# Altium integrated library Communication_Lib.IntLib: 23 symbols
Pins are listed as number, name and electrical type; pins without a type are passive.

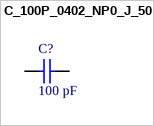
[diagram p0: symbol C_100P_0402_NP0_J_50]

## C_100P_0402_NP0_J_50
designator C?, comment 100 pF
Part Number: GRM1555C1H101JZ01D; Manufacturer: Murata; Value: 100 pF
footprint CAPC1005X55X25LL05T10 (Chip Capacitor, 2-Leads, Body 1.00x0.50mm, IPC High Density)
footprint CAPC1005X55X25NL05T10 (Chip Capacitor, 2-Leads, Body 1.00x0.50mm, IPC Medium Density)
footprint CAPC1005X55X25ML05T10 (Chip Capacitor, 2-Leads, Body 1.00x0.50mm, IPC Low Density)
pins: 1, 2
1 alternate drawing of the same symbol


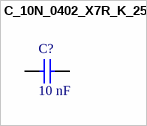
[diagram p1: symbol C_10N_0402_X7R_K_25]

## C_10N_0402_X7R_K_25
designator C?, comment 10 nF
Manufacturer: Murata; Part Number: GRM155R71E103KA01D; Value: 10 nF
footprint CAPC1005X55X25LL05T10 (Chip Capacitor, 2-Leads, Body 1.05x0.55mm, IPC High Density)
footprint CAPC1005X55X25NL05T10 (Chip Capacitor, 2-Leads, Body 1.05x0.55mm, IPC Medium Density)
footprint CAPC1005X55X25ML05T10 (Chip Capacitor, 2-Leads, Body 1.05x0.55mm, IPC Low Density)
pins: 1, 2
1 alternate drawing of the same symbol


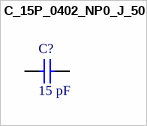
[diagram p2: symbol C_15P_0402_NP0_J_50]

## C_15P_0402_NP0_J_50
designator C?, comment 15 pF
Part Number: GRM1555C1H150JZ01D; Manufacturer: Murata; Value: 15 pF
footprint CAPC1005X55X25LL05T10 (Chip Capacitor, 2-Leads, Body 1.00x0.50mm, IPC High Density)
footprint CAPC1005X55X25NL05T10 (Chip Capacitor, 2-Leads, Body 1.00x0.50mm, IPC Medium Density)
footprint CAPC1005X55X25ML05T10 (Chip Capacitor, 2-Leads, Body 1.00x0.50mm, IPC Low Density)
pins: 1, 2
1 alternate drawing of the same symbol


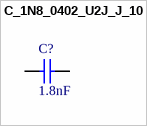
[diagram p3: symbol C_1N8_0402_U2J_J_10]

## C_1N8_0402_U2J_J_10
designator C?, comment 1.8nF
GRM1557U1A182JA01D; Manufacturer: Murata; Part Number: GRM1557U1A182JA01D; Value: 1.8nF
footprint CAPC1005X55X25LL05T10 (Chip Capacitor, 2-Leads, Body 1.05x0.55mm, IPC High Density)
footprint CAPC1005X55X25NL05T10 (Chip Capacitor, 2-Leads, Body 1.05x0.55mm, IPC Medium Density)
footprint CAPC1005X55X25ML05T10 (Chip Capacitor, 2-Leads, Body 1.05x0.55mm, IPC Low Density)
pins: 1, 2
1 alternate drawing of the same symbol


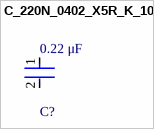
[diagram p4: symbol C_220N_0402_X5R_K_10]

## C_220N_0402_X5R_K_10
designator C?, comment 0.22 μF
C0603 0.22 μF X7R 30ppm/°C 10.00% 10 V; Manufacturer Part Number: C0603C224K8RAC; Manufacturer: KEMET; Automotive Grade: Grade 1; Material: Ceramic; Voltage Rating: 10 V; Tolerance: 0.1; Capacitance: 0.22 μF; Device Class L2: Capacitors; Temperature Range High: +125°C; RoHS: TRUE; Device Class L1: Passive Components; Temperature: -55°C to +125°C; Temperature Coefficient: 30ppm/°C; ComponentLink2Description: Datasheet; Device Class L3: Ceramic Capacitors; ComponentLink2URL: https://api.kemet.com/component-edge/download/datasheet/C0603C100J5GACAUTO.pdf; Value: 0.22 μF; Category: Cap; Lead Free: Yes; Automotive: Yes; Height: 0.87mm; Temperature Characteristic: X7R; Mouser Description: Multilayer Ceramic Capacitors MLCC - SMD/SMT 50volts 0.22 uF C0G X7R; Octopart: https://octopart.com/c0603c224k8rac-kemet-7455784; Package: C0603C-CF; Temperature Range Low: -55°C
footprint FP-C0603C-CF-IPC_B
footprint FP-C0603C-CF-MFG
footprint FP-C0603C-CF-IPC_A
footprint FP-C0603C-CF-IPC_C
pins: 1, 2


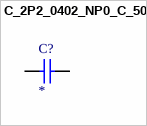
[diagram p5: symbol C_2P2_0402_NP0_C_50]

## C_2P2_0402_NP0_C_50
designator C?
Manufacturer: Murata; Part Number: GRM1555C1H2R2CZ01D; Value: *
footprint CAPC1005X55X25LL05T10 (Chip Capacitor, 2-Leads, Body 1.00x0.50mm, IPC High Density)
footprint CAPC1005X55X25NL05T10 (Chip Capacitor, 2-Leads, Body 1.00x0.50mm, IPC Medium Density)
footprint CAPC1005X55X25ML05T10 (Chip Capacitor, 2-Leads, Body 1.00x0.50mm, IPC Low Density)
pins: 1, 2
1 alternate drawing of the same symbol


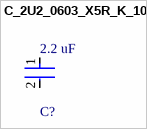
[diagram p6: symbol C_2U2_0603_X5R_K_10]

## C_2U2_0603_X5R_K_10
designator C?, comment 2.2 uF
0603 2.2 uF 6.3 V 10% Tolerance X7R Multilayer Ceramic Capacitor; Manufacturer: YAGEO; Manufacturer Part Number: CC0603KRX7R5BB225; Voltage Rating: 6.3 V; Temperature Coefficient: 15%; Tolerance: 0.1; Mouser Description: Multilayer Ceramic Capacitors MLCC - SMD/SMT 2.2uF 6.3V X7R 10%; Value: 2.2 uF; Lead Free: Yes; Temperature Range Low: -55°C; ComponentLink2Description: Datasheet; Package: CC0603-DA; Temperature Range High: +125°C; Voltage: 6.3 V; Octopart: https://octopart.com/cc0603krx7r5bb225-yageo-25629540; Category: Cap; Height: 0.9mm; Temperature Characteristic: X7R; RoHS: TRUE; Device Class L3: Ceramic Capacitors; Material: Ceramic; Automotive: No; Device Class L1: Passive Components; Capacitance: 2.2 uF; Digikey Description: 0603 2.2 uF 6.3 V 10% Tolerance X7R Multilayer Ceramic Capacitor; Temperature: -55°C to +125°C; ComponentLink2URL: http://www.yageo.com/documents/recent/UPY-GPHC_X7R_6.3V-to-50V_18.pdf; Footprint Url: http://www.yageo.com/exep/pages/download/literatures/UPY-C_GEN_24.pdf; Device Class L2: Capacitors
footprint FP-CC0603-DA-IPC_B
footprint FP-CC0603-DA-IPC_A
footprint FP-CC0603-DA-IPC_C
footprint FP-CC0603-DA-MFG
pins: 1, 2


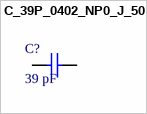
[diagram p7: symbol C_39P_0402_NP0_J_50]

## C_39P_0402_NP0_J_50
designator C?, comment 39 pF
Chip Capacitor, 39 pF, +/- 5%, 50 V, -55 to 125 degC, 0402 (1005 Metric), RoHS, Tape and Reel; PartNumber: GRM1555C1H390JZ01D; Voltage Rating (DC): 50 V; Type (Capacitors): C0G; Case\/Package: 0402; Length: 0.039 inch; RoHSCompliant: true; ComponentLink1URL: http://www.murata.com/; Packaging: Tape and Reel; Lead Pitch: 2 mm; PackageDescription: 2-Pin Surface Mount Device, Body 1 x 0.5 mm; PackageReference: 0402; Case Code (Metric): 1005; Pins: 2; Capacitance: 39 pF; Mounting Technology: Surface Mount; DatasheetVersion: 09/2016; REACH SVHC: No SVHC; Radiation Hardening: No; ComponentLink2Description: Datasheet; ComponentLink1Description: Manufacturer URL; Height: 0.5 mm; Package Quantity: 10000; Case Code (Imperial): 0402; Width: 0.02 inch; ComponentLink2URL: http://psearch.en.murata.com/capacitor/product/GRM1555C1H390JZ01_.pdf; Voltage Rating: 50 V; Max Operating Temperature: 125 degC; Min Operating Temperature: -55 degC; Mount: Surface Mount; Tolerance: 5%
footprint CAPC1005X55X25LL05T10 (Chip Capacitor, 2-Leads, Body 1.05x0.55mm, IPC High Density)
footprint CAPC1005X55X25ML05T10 (Chip Capacitor, 2-Leads, Body 1.05x0.55mm, IPC Low Density)
footprint CAPC1005X55X25NL05T10 (Chip Capacitor, 2-Leads, Body 1.05x0.55mm, IPC Medium Density)
pins: 1, 2


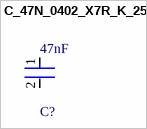
[diagram p8: symbol C_47N_0402_X7R_K_25]

## C_47N_0402_X7R_K_25
designator C?, comment 47nF
Chip Multilayer Ceramic Capacitors for General Purpose, 0402, 47000pF, X7R, 15%, 10%, 25V; Depth: 0.5mm; Capacitance: 47nF; Case/Package: 0402; Tolerance: 10%; REACH SVHC: No SVHC; Termination: SMD/SMT; Number of Pins: 2; Mount: Surface Mount; Radiation Hardening: No; Height: 0.5mm; Min Operating Temperature: -55°C; Max Operating Temperature: 125°C; Thickness: 0.022inch; Length: 1mm; Voltage Rating (DC): 25V; Material: Ceramic; Lead Free: Lead Free; Packaging: Tape and Reel; Dielectric: X7R; Voltage: 25V; Case Code (Metric): 1005; Width: 0.02inch; Case Code (Imperial): 0402; Voltage Rating: 25V; Package Quantity: 1
footprint FP-GRM155-0_05-IPC_A
footprint FP-GRM155-0_05-IPC_C
footprint FP-GRM155-0_05-IPC_B
footprint FP-GRM155-0_05-MFG
pins: 1, 2


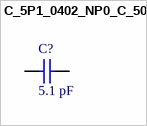
[diagram p9: symbol C_5P1_0402_NP0_C_50]

## C_5P1_0402_NP0_C_50
designator C?, comment 5.1 pF
Part Number: GRM1555C1H5R1CZ01D; Manufacturer: Murata; Value: 5.1 pF
footprint CAPC1005X55X25LL05T10 (Chip Capacitor, 2-Leads, Body 1.05x0.55mm, IPC High Density)
footprint CAPC1005X55X25NL05T10 (Chip Capacitor, 2-Leads, Body 1.05x0.55mm, IPC Medium Density)
footprint CAPC1005X55X25ML05T10 (Chip Capacitor, 2-Leads, Body 1.05x0.55mm, IPC Low Density)
pins: 1, 2
1 alternate drawing of the same symbol


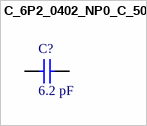
[diagram p10: symbol C_6P2_0402_NP0_C_50]

## C_6P2_0402_NP0_C_50
designator C?, comment 6.2 pF
Manufacturer: AVX Interconnect / Elco; Part Number: 04025A6R2CAT2A; Value: 6.2 pF
footprint CAPC1005X60X25ML10T15 (Chip Capacitor, 2-Leads, Body 1.00x0.50mm, IPC Low Density)
footprint CAPC1005X60X25NL10T15 (Chip Capacitor, 2-Leads, Body 1.00x0.50mm, IPC Medium Density)
footprint CAPC1005X60X25LL10T15 (Chip Capacitor, 2-Leads, Body 1.00x0.50mm, IPC High Density)
pins: 1, 2
1 alternate drawing of the same symbol


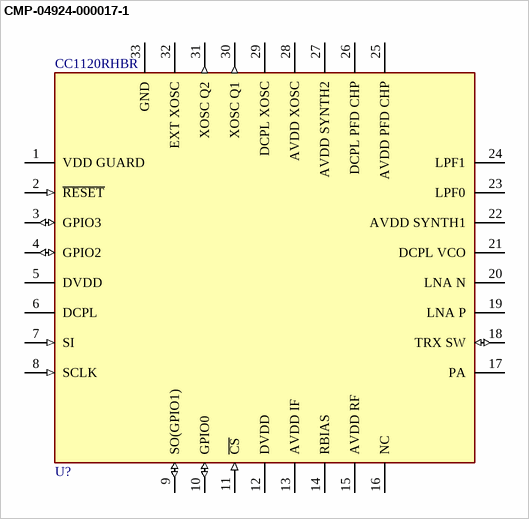
[diagram p11: symbol CMP-04924-000017-1]

## CMP-04924-000017-1
designator U?, comment CC1120RHBR
IC RF TXRX+MCU ISM<1GHZ 32VFQFN; Min Supply Voltage: 2V; Max Frequency: 480MHz; Frequency: 960MHz; Sensitivity: -127dBm; Max Supply Voltage: 3.6V; Current - Receiving: 23mA; Number of Receivers: 1; Data Rate: 200Kbps; Current - Transmitting: 54mA; Interface: SPI; Min Frequency: 164MHz; Density: 0B; Output Power (dBm): 16dBm; RoHS Compliant: Yes; Package Quantity: 1; Lead Free: Lead Free; Number of Transmitters: 1; Max Operating Temperature: 85°C; REACH SVHC: No SVHC; Min Operating Temperature: -40°C; Radiation Hardening: No; Series: CC1120; Number of Pins: 32; Packaging: Tape and Reel; Case/Package: VQFN; Mount: Surface Mount
footprint FP-RHB0032E-MFG
footprint FP-RHB0032E-IPC_C
footprint FP-RHB0032E-IPC_B
footprint FP-RHB0032E-IPC_A
pins: 1 VDD GUARD (power), 2 ~{RESET} (in), 3 GPIO3 (io), 4 GPIO2 (io), 5 DVDD (power), 6 DCPL, 7 SI (in), 8 SCLK (in), 9 SO(GPIO1) (io), 10 GPIO0 (io), 11 ~{CS} (in), 12 DVDD (power), 13 AVDD IF (power), 14 RBIAS, 15 AVDD RF (power), 16 NC, 17 PA, 18 TRX SW (io), 19 LNA P, 20 LNA N, 21 DCPL VCO (power), 22 AVDD SYNTH1 (power), 23 LPF0, 24 LPF1, 25 AVDD PFD CHP (power), 26 DCPL PFD CHP (power), 27 AVDD SYNTH2 (power), 28 AVDD XOSC (power), 29 DCPL XOSC, 30 XOSC Q1 (out), 31 XOSC Q2 (out), 32 EXT XOSC, 33 GND (power)


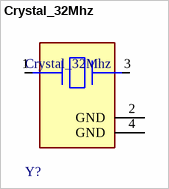
[diagram p12: symbol Crystal_32Mhz]

## Crystal_32Mhz
designator Y?
Crystal 32MHz ±10ppm 6pF SMD-4 2.5mm x 2mm
footprint FP-ABM10W-MFG
pins: 1, 2 GND (power), 3, 4 GND (power)


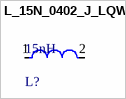
[diagram p13: symbol L_15N_0402_J_LQW]

## L_15N_0402_J_LQW
designator L?, comment 15nH
Wire Wound RF Inductor 15nH ±5% 460mA 0.16Ω 0402 (1005); Test Frequency: 100MHz; DC Resistance (DCR): 160mR; Shielding: Unshielded; Q Factor: 30; Core Material: Air; Self Resonant Frequency: 5GHz; Resistor Type: Wirewound; DC Current: 460mA; Inductance: 15nH; Weight: 2.8E-05oz; Radiation Hardening: No; Depth: 0.7mm; Package Quantity: 10000; Case/Package: 0402; Packaging: Tape and Reel; Length: 1mm; Max DC Current: 460mA; Case Code (Imperial): 0402; Tolerance: 5%; Min Operating Temperature: -55°C; Lead Free: Lead Free; Width: 0.02inch; Case Code (Metric): 1005; Termination: SMD/SMT; Military Standard: Not; Current Rating: 460mA; Height: 0.5mm; Mount: Surface Mount; Max Operating Temperature: 125°C
footprint FP-LQW15AN_00-W0_6-0_1-MFG
pins: 1, 2


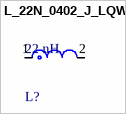
[diagram p14: symbol L_22N_0402_J_LQW]

## L_22N_0402_J_LQW
designator L?, comment 22 nH
Multilayer type Inductor for Automotive 22nH ±2% 0.42Ω 350mA 0402; Value: 22 nH
footprint FP-LQG15HH_02-IPC_B
footprint FP-LQG15HH_02-IPC_A
footprint FP-LQG15HH_02-MFG
footprint FP-LQG15HH_02-IPC_C
pins: 1, 2


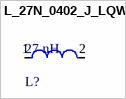
[diagram p15: symbol L_27N_0402_J_LQW]

## L_27N_0402_J_LQW
designator L?, comment 27 nH
Wire Wound RF Inductor 27nH ±5% 280mA 0.52Ω 0402 (1005); Test Frequency: 100MHz; DC Resistance (DCR): 520mR; Q Factor: 25; Self Resonant Frequency: 3.5GHz; Core Material: Air; Shielding: Unshielded; Mount: Surface Mount; Package Quantity: 10000; Max Operating Temperature: 125°C; Termination: SMD/SMT; Weight: 2.8E-05oz; Case Code (Metric): 1005; Radiation Hardening: No; Case Code (Imperial): 0402; Military Standard: Not; Packaging: Tape and Reel; Tolerance: 5%; Lead Free: Lead Free; Depth: 0.6mm; DC Current: 280mA; Inductance: 27nH; Current Rating: 280mA; Min Operating Temperature: -55°C; Width: 0.02inch; Height: 0.5mm; Length: 1mm; Max DC Current: 280mA; Case/Package: 0402; Resistor Type: Wirewound; Value: 27 nH
footprint FP-LQW15AN_00-W0_5-0_1-MFG
pins: 1, 2


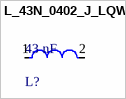
[diagram p16: symbol L_43N_0402_J_LQW]

## L_43N_0402_J_LQW
designator L?, comment 43 nF
Wire Wound RF Inductor 43nH ±5% 250mA 0.7Ω 0402 (1005); Test Frequency: 100MHz; Current: 145mA; Core Material: Air; Self Resonant Frequency: 3GHz; DC Resistance (DCR): 700mR; Shielding: Unshielded; Q Factor: 25; REACH SVHC: No SVHC; Case/Package: 0402; Package Quantity: 1; Termination: SMD/SMT; Max Operating Temperature: 125°C; Case Code (Imperial): 0402; Height: 0.5mm; DC Current: 250mA; Inductance Tolerance: 5%; Length: 1mm; Tolerance: 5%; Max DC Current: 250mA; Min Operating Temperature: -55°C; Depth: 0.6mm; Radiation Hardening: No; Inductance: 43nH; Military Standard: Not; Packaging: Tape and Reel; Current Rating: 250mA; Case Code (Metric): 1005; Width: 0.02inch; Weight: 2.8E-05oz; Mount: Surface Mount; Value: 43 nF
footprint FP-LQW15AN_00-W0_5-0_1-MFG
pins: 1, 2


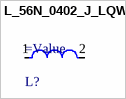
[diagram p17: symbol L_56N_0402_J_LQW]

## L_56N_0402_J_LQW
designator L?
Wire Wound RF Inductor 56nH ±5% 200mA 1.17Ω 0402 (1005); Test Frequency: 100MHz; Shielding: Unshielded; Self Resonant Frequency: 2.8GHz; Core Material: Air; Q Factor: 25; DC Resistance (DCR): 1.17R; Termination: SMD/SMT; Case Code (Imperial): 0402; Resistor Type: Wirewound; Mount: Surface Mount; Tolerance: 5%; Lead Free: Lead Free; Height: 0.5mm; Packaging: Tape and Reel; Min Operating Temperature: -55°C; Max DC Current: 200mA; Case/Package: 0402; Package Quantity: 10000; Military Standard: Not; Current Rating: 200mA; DC Current: 200mA; Inductance: 56nH; Depth: 0.6mm; Radiation Hardening: No; Case Code (Metric): 1005; Max Operating Temperature: 125°C; Length: 1mm; Weight: 2.8E-05oz; Width: 0.5mm; =Value: 56 nH
footprint FP-LQW15AN_00-W0_5-0_1-MFG
pins: 1, 2


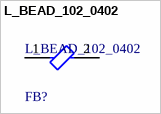
[diagram p18: symbol L_BEAD_102_0402]

## L_BEAD_102_0402
designator FB?
Chip Ferrite Bead, 0402, 1000Ω @ 100MHz, 1.1Ω, 25%, 250mA; Number of Circuits: 1; DC Resistance-Max: 1.1R; Impedance: 1kR; Material: Steel; Shielding: Unshielded; Number of Pins: 2; REACH SVHC: No SVHC; Case/Package: 0402; Core Material: Ferrite; Packaging: Tape and Reel; Max DC Current: 250mA; Test Frequency: 100MHz; Case Code (Metric): 1005; Height: 0.5mm; Military Standard: Not; Max Operating Temperature: 125°C; Termination: SMD/SMT; Tolerance: 25%; Length: 1mm; Number of Lines: 1; Min Operating Temperature: -55°C; Depth: 0.5mm; Case Code (Imperial): 0402; DC Current: 250mA; Contact Plating: Tin; Series: BLM15H; Radiation Hardening: No; Width: 0.5mm; DC Resistance (DCR): 1.1R; Max Current Rating: 250mA; Current Rating: 250mA; Package Quantity: 1; Lead Free: Lead Free; Frequency: 100MHz
footprint FP-BLM15-0_05-IPC_C
footprint FP-BLM15-0_05-IPC_A
footprint FP-BLM15-0_05-MFG
footprint FP-BLM15-0_05-IPC_B
pins: 1, 2


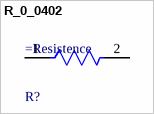
[diagram p19: symbol R_0_0402]

## R_0_0402
designator R?
RES 0 OHM JUMPER 0402; Power Rating: 1W; Resistance: 0mR; Tolerance: 5%; Temperature Coefficient: 200ppm/°C; Max Operating Temperature: 155°C; Case Code (Imperial): 0402; RoHS Compliant: Yes; Case Code (Metric): 1005; Construction: Rectangular; Series: RK73Z; Military Standard: Not; Package Quantity: 10000; Lead Free: Lead Free; Packaging: Tape and Reel; Case/Package: 0402; Resistor Type: Thick Film; Min Operating Temperature: -55°C; Width: 0.5mm; Depth: 0.5mm; Termination: SMD/SMT; Height: 0.35mm; Length: 1mm
footprint FP-RK73Z1E-IPC_B
footprint FP-RK73Z1E-MFG
footprint FP-RK73Z1E-IPC_A
footprint FP-RK73Z1E-IPC_C
pins: 1, 2


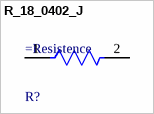
[diagram p20: symbol R_18_0402_J]

## R_18_0402_J
designator R?
18Ω ±5% 0.063W 0402 Thick Film Chip Resistor AEC-Q200 compliant; Resistance: 18R; Max Power Dissipation: 63mW; Temperature Coefficient: 100ppm/°C; Lead Free: Lead Free; Resistor Type: Thick Film; Packaging: Tape and Reel; Tolerance: 5%; Contact Plating: Tin; Mount: Surface Mount; Min Operating Temperature: -55°C; Case/Package: 0402; Case Code (Metric): 1005; Number of Terminations: 2; Series: RMCF; Length: 0.039inch; Width: 0.02inch; Height: 0.016inch; RoHS Compliant: Yes; Features: Automotive AEC-Q200; Max Operating Temperature: 155°C; Case Code (Imperial): 0402
footprint FP-RMCF0402-IPC_B
footprint FP-RMCF0402-MFG
footprint FP-RMCF0402-IPC_A
footprint FP-RMCF0402-IPC_C
pins: 1, 2


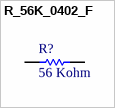
[diagram p21: symbol R_56K_0402_F]

## R_56K_0402_F
designator R?, comment 56 Kohm
R_56K_0402_F; Part Number: RK73H1ETTP5602F; Manufacturer: KOA Speer; Value: 56 Kohm
footprint RESC1005X40X25ML10T10 (Chip Resistor, 2-Leads, Body 1.00x0.50mm, IPC Low Density)
footprint RESC1005X40X25NL10T10 (Chip Resistor, 2-Leads, Body 1.00x0.50mm, IPC Medium Density)
footprint RESC1005X40X25LL10T10 (Chip Resistor, 2-Leads, Body 1.00x0.50mm, IPC High Density)
pins: 1, 2
1 alternate drawing of the same symbol


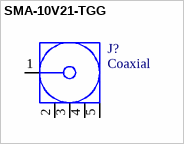
[diagram p22: symbol SMA-10V21-TGG]

## SMA-10V21-TGG
designator J?, comment Coaxial
Rf Coax Conn, Sma Jack, 50 Ohm, Pcb Rohs Compliant: Yes |Wurth Elektronik 60312202114512; Impedance: 50Ω; Insulation Resistance: 5GΩ; Insertion Loss (dB): 0.14dB; Min Operating Temperature: -65°C; Max Operating Temperature: 165°C; Orientation: Straight; Connector Type: SMA; Insulation Material: PTFE
footprint 60312202114512 (SMA PCB End Launch Jack Flat  Tab for 1.1mm PCB)
pins: 1 Signal "Signal Pin", 2 GND, 3 GND, 4 GND, 5 GND